# Altium schematic symbol library GRM2165C1H180JZ01D.SchLib: 1 symbol
Pins are listed as number, name and electrical type; pins without a type are passive.

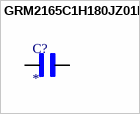
[diagram p0: symbol GRM2165C1H180JZ01D]

## GRM2165C1H180JZ01D
designator C?
18 pF Â±5% 50V Ceramic Capacitor C0G, NP0 0805 (2012 Metric); MPN: GRM2165C1H180JZ01D; MANUFACTURER: Murata; Package: 2012 Murata; DATASHEET_URL: https://s3.amazonaws.com/snapeda/datasheet/GRM2165C1H180JZ01D_Murata.pdf; Value: *; SOURCE_URL: https://www.snapeda.com/parts/GRM2165C1H180JZ01D/Murata/view-part/
footprint CAPC2012X70N
pins: 1, 2